# Altium integrated library S5B-PH-K-S_LF__SN_.IntLib: 1 symbol
Pins are listed as number, name and electrical type; pins without a type are passive.

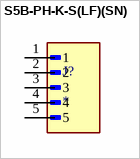
[diagram p0: symbol S5B-PH-K-S(LF)(SN)]

## S5B-PH-K-S(LF)(SN)
designator J?
Connector Header Through Hole, Right Angle 5 position 0.079 (2.00mm); MF: JST Sales; MP: S5B-PH-K-S(LF)(SN); SnapEDA_Link: https://www.snapeda.com/parts/S5B-PH-K-S(LF)(SN)/JST/view-part/?ref=snap; Package: NON STANDARD-5 J.S.T.; Value: *; Check_prices: https://www.snapeda.com/parts/S5B-PH-K-S(LF)(SN)/JST/view-part/?ref=eda
footprint JST_S5B-PH-K-S(LF)(SN)
pins: 1, 2, 3, 4, 5